# Altium footprint library MY_LIB_Connectors_CONNFLY.PcbLib: 239 footprints (part 12 of 15)
Each footprint in its own frame and in the unit in brackets; x right, y up, seen from the top. Pads: shape width x height; smd on the part's side, far side on the other; paste and mask are expansions set on the pad; w line width, h text height; cw(c..) or ccw(c..) is an arc to the next point about the centre after c.
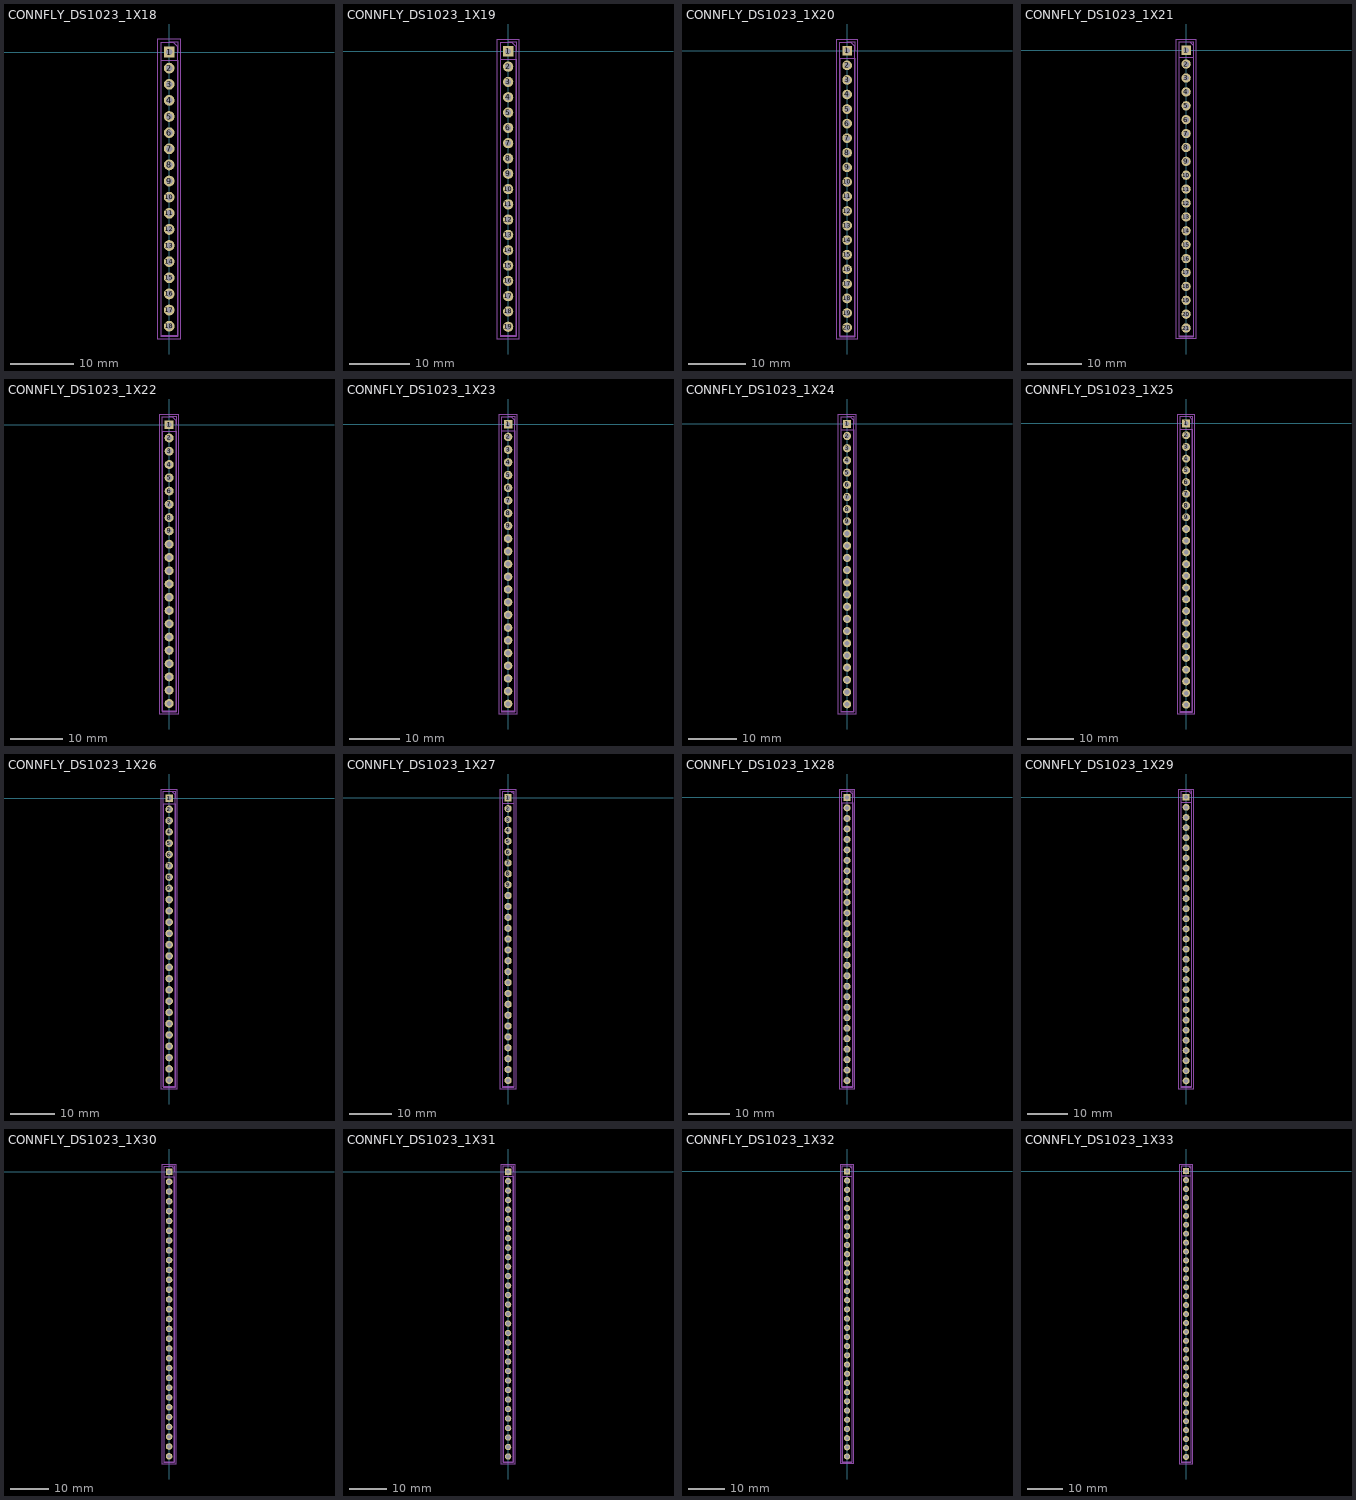
[diagram p11: the footprints below, top view; thin cyan lines are the x and y axes]

## CONNFLY_DS1023_1X18 [mm] "Connfly DS1023 1x18 standard KiCad; PTH1.0 pad1.7 pitch2.54; CC-BY-SA-4.0; STEP generic"
height 8.5
pads (18):
  rect 1.7x1.7 hole 1 paste-2539.97 mask+0.05: 1(0,0)
  round 1.7 hole 1 paste-2539.97 mask+0.05: 2(0,-2.54) 3(0,-5.08) 4(0,-7.62) 5(0,-10.16) 6(0,-12.7) 7(0,-15.24) 8(0,-17.78) 9(0,-20.32) 10(0,-22.86) 11(0,-25.4) 12(0,-27.94) 13(0,-30.48) 14(0,-33.02) 15(0,-35.56) 16(0,-38.1) 17(0,-40.64) 18(0,-43.18)
Mechanical 15:
  lines w0.05: -1.8,-45.2 -1.8,2.05 1.75,2.05 1.75,-45.2 -1.8,-45.2
  lines w0.1: -1.27,-44.7 -1.27,1.52 0.635,1.52 1.27,0.885 1.27,-44.7 -1.27,-44.7
  lines w0.12: 0,1.58 1.33,1.58 1.33,0 ; -1.33,-44.76 -1.33,-1.27 1.33,-1.27 1.33,-44.76 -1.33,-44.76
3D body "PinSocket_1x18_P2.54mm_Vertical.step": height 8.5, standoff -3.1, extent -1.27,-44.7 1.27,1.52

## CONNFLY_DS1023_1X19 [mm] "Connfly DS1023 1x19 standard KiCad; PTH1.0 pad1.7 pitch2.54; CC-BY-SA-4.0; STEP generic"
height 8.5
pads (19):
  rect 1.7x1.7 hole 1 paste-2539.97 mask+0.05: 1(0,0)
  round 1.7 hole 1 paste-2539.97 mask+0.05: 2(0,-2.54) 3(0,-5.08) 4(0,-7.62) 5(0,-10.16) 6(0,-12.7) 7(0,-15.24) 8(0,-17.78) 9(0,-20.32) 10(0,-22.86) 11(0,-25.4) 12(0,-27.94) 13(0,-30.48) 14(0,-33.02) 15(0,-35.56) 16(0,-38.1) 17(0,-40.64) 18(0,-43.18) 19(0,-45.72)
Mechanical 15:
  lines w0.05: -1.8,-47.75 -1.8,2.05 1.75,2.05 1.75,-47.75 -1.8,-47.75
  lines w0.1: -1.27,-47.24 -1.27,1.52 0.635,1.52 1.27,0.885 1.27,-47.24 -1.27,-47.24
  lines w0.12: 0,1.58 1.33,1.58 1.33,0 ; -1.33,-47.3 -1.33,-1.27 1.33,-1.27 1.33,-47.3 -1.33,-47.3
3D body "PinSocket_1x19_P2.54mm_Vertical.step": height 8.5, standoff -3.1, extent -1.27,-47.24 1.27,1.52

## CONNFLY_DS1023_1X20 [mm] "Connfly DS1023 1x20 standard KiCad; PTH1.0 pad1.7 pitch2.54; CC-BY-SA-4.0; STEP generic"
height 8.5
pads (20):
  rect 1.7x1.7 hole 1 paste-2539.97 mask+0.05: 1(0,0)
  round 1.7 hole 1 paste-2539.97 mask+0.05: 2(0,-2.54) 3(0,-5.08) 4(0,-7.62) 5(0,-10.16) 6(0,-12.7) 7(0,-15.24) 8(0,-17.78) 9(0,-20.32) 10(0,-22.86) 11(0,-25.4) 12(0,-27.94) 13(0,-30.48) 14(0,-33.02) 15(0,-35.56) 16(0,-38.1) 17(0,-40.64) 18(0,-43.18) 19(0,-45.72) 20(0,-48.26)
Mechanical 15:
  lines w0.05: -1.8,-50.25 -1.8,2.05 1.75,2.05 1.75,-50.25 -1.8,-50.25
  lines w0.1: -1.27,-49.78 -1.27,1.52 0.635,1.52 1.27,0.885 1.27,-49.78 -1.27,-49.78
  lines w0.12: 0,1.58 1.33,1.58 1.33,0 ; -1.33,-49.84 -1.33,-1.27 1.33,-1.27 1.33,-49.84 -1.33,-49.84
3D body "PinSocket_1x20_P2.54mm_Vertical.step": height 8.5, standoff -3.1, extent -1.27,-49.78 1.27,1.52

## CONNFLY_DS1023_1X21 [mm] "Connfly DS1023 1x21 standard KiCad; PTH1.0 pad1.7 pitch2.54; CC-BY-SA-4.0; STEP generic"
height 8.5
pads (21):
  rect 1.7x1.7 hole 1 paste-2539.97 mask+0.05: 1(0,0)
  round 1.7 hole 1 paste-2539.97 mask+0.05: 2(0,-2.54) 3(0,-5.08) 4(0,-7.62) 5(0,-10.16) 6(0,-12.7) 7(0,-15.24) 8(0,-17.78) 9(0,-20.32) 10(0,-22.86) 11(0,-25.4) 12(0,-27.94) 13(0,-30.48) 14(0,-33.02) 15(0,-35.56) 16(0,-38.1) 17(0,-40.64) 18(0,-43.18) 19(0,-45.72) 20(0,-48.26) 21(0,-50.8)
Mechanical 15:
  lines w0.05: -1.8,-52.8 -1.8,2.05 1.75,2.05 1.75,-52.8 -1.8,-52.8
  lines w0.1: -1.27,-52.32 -1.27,1.52 0.635,1.52 1.27,0.885 1.27,-52.32 -1.27,-52.32
  lines w0.12: 0,1.58 1.33,1.58 1.33,0 ; -1.33,-52.38 -1.33,-1.27 1.33,-1.27 1.33,-52.38 -1.33,-52.38
3D body "PinSocket_1x21_P2.54mm_Vertical.step": height 8.5, standoff -3.1, extent -1.27,-52.32 1.27,1.52

## CONNFLY_DS1023_1X22 [mm] "Connfly DS1023 1x22 standard KiCad; PTH1.0 pad1.7 pitch2.54; CC-BY-SA-4.0; STEP generic"
height 8.5
pads (22):
  rect 1.7x1.7 hole 1 paste-2539.97 mask+0.05: 1(0,0)
  round 1.7 hole 1 paste-2539.97 mask+0.05: 2(0,-2.54) 3(0,-5.08) 4(0,-7.62) 5(0,-10.16) 6(0,-12.7) 7(0,-15.24) 8(0,-17.78) 9(0,-20.32) 10(0,-22.86) 11(0,-25.4) 12(0,-27.94) 13(0,-30.48) 14(0,-33.02) 15(0,-35.56) 16(0,-38.1) 17(0,-40.64) 18(0,-43.18) 19(0,-45.72) 20(0,-48.26) 21(0,-50.8) 22(0,-53.34)
Mechanical 15:
  lines w0.05: -1.8,-55.35 -1.8,2.05 1.75,2.05 1.75,-55.35 -1.8,-55.35
  lines w0.1: -1.27,-54.86 -1.27,1.52 0.635,1.52 1.27,0.885 1.27,-54.86 -1.27,-54.86
  lines w0.12: 0,1.58 1.33,1.58 1.33,0 ; -1.33,-54.92 -1.33,-1.27 1.33,-1.27 1.33,-54.92 -1.33,-54.92
3D body "PinSocket_1x22_P2.54mm_Vertical.step": height 8.5, standoff -3.1, extent -1.27,-54.86 1.27,1.52

## CONNFLY_DS1023_1X23 [mm] "Connfly DS1023 1x23 standard KiCad; PTH1.0 pad1.7 pitch2.54; CC-BY-SA-4.0; STEP generic"
height 8.5
pads (23):
  rect 1.7x1.7 hole 1 paste-2539.97 mask+0.05: 1(0,0)
  round 1.7 hole 1 paste-2539.97 mask+0.05: 2(0,-2.54) 3(0,-5.08) 4(0,-7.62) 5(0,-10.16) 6(0,-12.7) 7(0,-15.24) 8(0,-17.78) 9(0,-20.32) 10(0,-22.86) 11(0,-25.4) 12(0,-27.94) 13(0,-30.48) 14(0,-33.02) 15(0,-35.56) 16(0,-38.1) 17(0,-40.64) 18(0,-43.18) 19(0,-45.72) 20(0,-48.26) 21(0,-50.8) 22(0,-53.34) 23(0,-55.88)
Mechanical 15:
  lines w0.05: -1.8,-57.9 -1.8,2.05 1.75,2.05 1.75,-57.9 -1.8,-57.9
  lines w0.1: -1.27,-57.4 -1.27,1.52 0.635,1.52 1.27,0.885 1.27,-57.4 -1.27,-57.4
  lines w0.12: 0,1.58 1.33,1.58 1.33,0 ; -1.33,-57.46 -1.33,-1.27 1.33,-1.27 1.33,-57.46 -1.33,-57.46
3D body "PinSocket_1x23_P2.54mm_Vertical.step": height 8.5, standoff -3.1, extent -1.27,-57.4 1.27,1.52

## CONNFLY_DS1023_1X24 [mm] "Connfly DS1023 1x24 standard KiCad; PTH1.0 pad1.7 pitch2.54; CC-BY-SA-4.0; STEP generic"
height 8.5
pads (24):
  rect 1.7x1.7 hole 1 paste-2539.97 mask+0.05: 1(0,0)
  round 1.7 hole 1 paste-2539.97 mask+0.05: 2(0,-2.54) 3(0,-5.08) 4(0,-7.62) 5(0,-10.16) 6(0,-12.7) 7(0,-15.24) 8(0,-17.78) 9(0,-20.32) 10(0,-22.86) 11(0,-25.4) 12(0,-27.94) 13(0,-30.48) 14(0,-33.02) 15(0,-35.56) 16(0,-38.1) 17(0,-40.64) 18(0,-43.18) 19(0,-45.72) 20(0,-48.26) 21(0,-50.8) 22(0,-53.34) 23(0,-55.88) 24(0,-58.42)
Mechanical 15:
  lines w0.05: -1.8,-60.45 -1.8,2.05 1.75,2.05 1.75,-60.45 -1.8,-60.45
  lines w0.1: -1.27,-59.94 -1.27,1.52 0.635,1.52 1.27,0.885 1.27,-59.94 -1.27,-59.94
  lines w0.12: 0,1.58 1.33,1.58 1.33,0 ; -1.33,-60 -1.33,-1.27 1.33,-1.27 1.33,-60 -1.33,-60
3D body "PinSocket_1x24_P2.54mm_Vertical.step": height 8.5, standoff -3.1, extent -1.27,-59.94 1.27,1.52

## CONNFLY_DS1023_1X25 [mm] "Connfly DS1023 1x25 standard KiCad; PTH1.0 pad1.7 pitch2.54; CC-BY-SA-4.0; STEP generic"
height 8.5
pads (25):
  rect 1.7x1.7 hole 1 paste-2539.97 mask+0.05: 1(0,0)
  round 1.7 hole 1 paste-2539.97 mask+0.05: 2(0,-2.54) 3(0,-5.08) 4(0,-7.62) 5(0,-10.16) 6(0,-12.7) 7(0,-15.24) 8(0,-17.78) 9(0,-20.32) 10(0,-22.86) 11(0,-25.4) 12(0,-27.94) 13(0,-30.48) 14(0,-33.02) 15(0,-35.56) 16(0,-38.1) 17(0,-40.64) 18(0,-43.18) 19(0,-45.72) 20(0,-48.26) 21(0,-50.8) 22(0,-53.34) 23(0,-55.88) 24(0,-58.42) 25(0,-60.96)
Mechanical 15:
  lines w0.05: -1.8,-62.95 -1.8,2.05 1.75,2.05 1.75,-62.95 -1.8,-62.95
  lines w0.1: -1.27,-62.48 -1.27,1.52 0.635,1.52 1.27,0.885 1.27,-62.48 -1.27,-62.48
  lines w0.12: 0,1.58 1.33,1.58 1.33,0 ; -1.33,-62.54 -1.33,-1.27 1.33,-1.27 1.33,-62.54 -1.33,-62.54
3D body "PinSocket_1x25_P2.54mm_Vertical.step": height 8.5, standoff -3.1, extent -1.27,-62.48 1.27,1.52

## CONNFLY_DS1023_1X26 [mm] "Connfly DS1023 1x26 standard KiCad; PTH1.0 pad1.7 pitch2.54; CC-BY-SA-4.0; STEP generic"
height 8.5
pads (26):
  rect 1.7x1.7 hole 1 paste-2539.97 mask+0.05: 1(0,0)
  round 1.7 hole 1 paste-2539.97 mask+0.05: 2(0,-2.54) 3(0,-5.08) 4(0,-7.62) 5(0,-10.16) 6(0,-12.7) 7(0,-15.24) 8(0,-17.78) 9(0,-20.32) 10(0,-22.86) 11(0,-25.4) 12(0,-27.94) 13(0,-30.48) 14(0,-33.02) 15(0,-35.56) 16(0,-38.1) 17(0,-40.64) 18(0,-43.18) 19(0,-45.72) 20(0,-48.26) 21(0,-50.8) 22(0,-53.34) 23(0,-55.88) 24(0,-58.42) 25(0,-60.96) 26(0,-63.5)
Mechanical 15:
  lines w0.05: -1.8,-65.5 -1.8,2.05 1.75,2.05 1.75,-65.5 -1.8,-65.5
  lines w0.1: -1.27,-65.02 -1.27,1.52 0.635,1.52 1.27,0.885 1.27,-65.02 -1.27,-65.02
  lines w0.12: 0,1.58 1.33,1.58 1.33,0 ; -1.33,-65.08 -1.33,-1.27 1.33,-1.27 1.33,-65.08 -1.33,-65.08
3D body "PinSocket_1x26_P2.54mm_Vertical.step": height 8.5, standoff -3.1, extent -1.27,-65.02 1.27,1.52

## CONNFLY_DS1023_1X27 [mm] "Connfly DS1023 1x27 standard KiCad; PTH1.0 pad1.7 pitch2.54; CC-BY-SA-4.0; STEP generic"
height 8.5
pads (27):
  rect 1.7x1.7 hole 1 paste-2539.97 mask+0.05: 1(0,0)
  round 1.7 hole 1 paste-2539.97 mask+0.05: 2(0,-2.54) 3(0,-5.08) 4(0,-7.62) 5(0,-10.16) 6(0,-12.7) 7(0,-15.24) 8(0,-17.78) 9(0,-20.32) 10(0,-22.86) 11(0,-25.4) 12(0,-27.94) 13(0,-30.48) 14(0,-33.02) 15(0,-35.56) 16(0,-38.1) 17(0,-40.64) 18(0,-43.18) 19(0,-45.72) 20(0,-48.26) 21(0,-50.8) 22(0,-53.34) 23(0,-55.88) 24(0,-58.42) 25(0,-60.96) 26(0,-63.5) 27(0,-66.04)
Mechanical 15:
  lines w0.05: -1.8,-68.05 -1.8,2.05 1.75,2.05 1.75,-68.05 -1.8,-68.05
  lines w0.1: -1.27,-67.56 -1.27,1.52 0.635,1.52 1.27,0.885 1.27,-67.56 -1.27,-67.56
  lines w0.12: 0,1.58 1.33,1.58 1.33,0 ; -1.33,-67.62 -1.33,-1.27 1.33,-1.27 1.33,-67.62 -1.33,-67.62
3D body "PinSocket_1x27_P2.54mm_Vertical.step": height 8.5, standoff -3.1, extent -1.27,-67.56 1.27,1.52

## CONNFLY_DS1023_1X28 [mm] "Connfly DS1023 1x28 standard KiCad; PTH1.0 pad1.7 pitch2.54; CC-BY-SA-4.0; STEP generic"
height 8.5
pads (28):
  rect 1.7x1.7 hole 1 paste-2539.97 mask+0.05: 1(0,0)
  round 1.7 hole 1 paste-2539.97 mask+0.05: 2(0,-2.54) 3(0,-5.08) 4(0,-7.62) 5(0,-10.16) 6(0,-12.7) 7(0,-15.24) 8(0,-17.78) 9(0,-20.32) 10(0,-22.86) 11(0,-25.4) 12(0,-27.94) 13(0,-30.48) 14(0,-33.02) 15(0,-35.56) 16(0,-38.1) 17(0,-40.64) 18(0,-43.18) 19(0,-45.72) 20(0,-48.26) 21(0,-50.8) 22(0,-53.34) 23(0,-55.88) 24(0,-58.42) 25(0,-60.96) 26(0,-63.5) 27(0,-66.04) 28(0,-68.58)
Mechanical 15:
  lines w0.05: -1.8,-70.6 -1.8,2.05 1.75,2.05 1.75,-70.6 -1.8,-70.6
  lines w0.1: -1.27,-70.1 -1.27,1.52 0.635,1.52 1.27,0.885 1.27,-70.1 -1.27,-70.1
  lines w0.12: 0,1.58 1.33,1.58 1.33,0 ; -1.33,-70.16 -1.33,-1.27 1.33,-1.27 1.33,-70.16 -1.33,-70.16
3D body "PinSocket_1x28_P2.54mm_Vertical.step": height 8.5, standoff -3.1, extent -1.27,-70.1 1.27,1.52

## CONNFLY_DS1023_1X29 [mm] "Connfly DS1023 1x29 standard KiCad; PTH1.0 pad1.7 pitch2.54; CC-BY-SA-4.0; STEP generic"
height 8.5
pads (29):
  rect 1.7x1.7 hole 1 paste-2539.97 mask+0.05: 1(0,0)
  round 1.7 hole 1 paste-2539.97 mask+0.05: 2(0,-2.54) 3(0,-5.08) 4(0,-7.62) 5(0,-10.16) 6(0,-12.7) 7(0,-15.24) 8(0,-17.78) 9(0,-20.32) 10(0,-22.86) 11(0,-25.4) 12(0,-27.94) 13(0,-30.48) 14(0,-33.02) 15(0,-35.56) 16(0,-38.1) 17(0,-40.64) 18(0,-43.18) 19(0,-45.72) 20(0,-48.26) 21(0,-50.8) 22(0,-53.34) 23(0,-55.88) 24(0,-58.42) 25(0,-60.96) 26(0,-63.5) 27(0,-66.04) 28(0,-68.58) 29(0,-71.12)
Mechanical 15:
  lines w0.05: -1.8,-73.15 -1.8,2.05 1.75,2.05 1.75,-73.15 -1.8,-73.15
  lines w0.1: -1.27,-72.64 -1.27,1.52 0.635,1.52 1.27,0.885 1.27,-72.64 -1.27,-72.64
  lines w0.12: 0,1.58 1.33,1.58 1.33,0 ; -1.33,-72.7 -1.33,-1.27 1.33,-1.27 1.33,-72.7 -1.33,-72.7
3D body "PinSocket_1x29_P2.54mm_Vertical.step": height 8.5, standoff -3.1, extent -1.27,-72.64 1.27,1.52

## CONNFLY_DS1023_1X30 [mm] "Connfly DS1023 1x30 standard KiCad; PTH1.0 pad1.7 pitch2.54; CC-BY-SA-4.0; STEP generic"
height 8.5
pads (30):
  rect 1.7x1.7 hole 1 paste-2539.97 mask+0.05: 1(0,0)
  round 1.7 hole 1 paste-2539.97 mask+0.05: 2(0,-2.54) 3(0,-5.08) 4(0,-7.62) 5(0,-10.16) 6(0,-12.7) 7(0,-15.24) 8(0,-17.78) 9(0,-20.32) 10(0,-22.86) 11(0,-25.4) 12(0,-27.94) 13(0,-30.48) 14(0,-33.02) 15(0,-35.56) 16(0,-38.1) 17(0,-40.64) 18(0,-43.18) 19(0,-45.72) 20(0,-48.26) 21(0,-50.8) 22(0,-53.34) 23(0,-55.88) 24(0,-58.42) 25(0,-60.96) 26(0,-63.5) 27(0,-66.04) 28(0,-68.58) 29(0,-71.12) 30(0,-73.66)
Mechanical 15:
  lines w0.05: -1.8,-75.65 -1.8,2.05 1.75,2.05 1.75,-75.65 -1.8,-75.65
  lines w0.1: -1.27,-75.18 -1.27,1.52 0.635,1.52 1.27,0.885 1.27,-75.18 -1.27,-75.18
  lines w0.12: 0,1.58 1.33,1.58 1.33,0 ; -1.33,-75.24 -1.33,-1.27 1.33,-1.27 1.33,-75.24 -1.33,-75.24
3D body "PinSocket_1x30_P2.54mm_Vertical.step": height 8.5, standoff -3.1, extent -1.27,-75.18 1.27,1.52

## CONNFLY_DS1023_1X31 [mm] "Connfly DS1023 1x31 standard KiCad; PTH1.0 pad1.7 pitch2.54; CC-BY-SA-4.0; STEP generic"
height 8.5
pads (31):
  rect 1.7x1.7 hole 1 paste-2539.97 mask+0.05: 1(0,0)
  round 1.7 hole 1 paste-2539.97 mask+0.05: 2(0,-2.54) 3(0,-5.08) 4(0,-7.62) 5(0,-10.16) 6(0,-12.7) 7(0,-15.24) 8(0,-17.78) 9(0,-20.32) 10(0,-22.86) 11(0,-25.4) 12(0,-27.94) 13(0,-30.48) 14(0,-33.02) 15(0,-35.56) 16(0,-38.1) 17(0,-40.64) 18(0,-43.18) 19(0,-45.72) 20(0,-48.26) 21(0,-50.8) 22(0,-53.34) 23(0,-55.88) 24(0,-58.42) 25(0,-60.96) 26(0,-63.5) 27(0,-66.04) 28(0,-68.58) 29(0,-71.12) 30(0,-73.66) 31(0,-76.2)
Mechanical 15:
  lines w0.05: -1.8,-78.2 -1.8,2.05 1.75,2.05 1.75,-78.2 -1.8,-78.2
  lines w0.1: -1.27,-77.72 -1.27,1.52 0.635,1.52 1.27,0.885 1.27,-77.72 -1.27,-77.72
  lines w0.12: 0,1.58 1.33,1.58 1.33,0 ; -1.33,-77.78 -1.33,-1.27 1.33,-1.27 1.33,-77.78 -1.33,-77.78
3D body "PinSocket_1x31_P2.54mm_Vertical.step": height 8.5, standoff -3.1, extent -1.27,-77.72 1.27,1.52

## CONNFLY_DS1023_1X32 [mm] "Connfly DS1023 1x32 standard KiCad; PTH1.0 pad1.7 pitch2.54; CC-BY-SA-4.0; STEP generic"
height 8.5
pads (32):
  rect 1.7x1.7 hole 1 paste-2539.97 mask+0.05: 1(0,0)
  round 1.7 hole 1 paste-2539.97 mask+0.05: 2(0,-2.54) 3(0,-5.08) 4(0,-7.62) 5(0,-10.16) 6(0,-12.7) 7(0,-15.24) 8(0,-17.78) 9(0,-20.32) 10(0,-22.86) 11(0,-25.4) 12(0,-27.94) 13(0,-30.48) 14(0,-33.02) 15(0,-35.56) 16(0,-38.1) 17(0,-40.64) 18(0,-43.18) 19(0,-45.72) 20(0,-48.26) 21(0,-50.8) 22(0,-53.34) 23(0,-55.88) 24(0,-58.42) 25(0,-60.96) 26(0,-63.5) 27(0,-66.04) 28(0,-68.58) 29(0,-71.12) 30(0,-73.66) 31(0,-76.2) 32(0,-78.74)
Mechanical 15:
  lines w0.05: -1.8,-80.8 -1.8,2.05 1.75,2.05 1.75,-80.8 -1.8,-80.8
  lines w0.1: -1.27,-80.26 -1.27,1.52 0.635,1.52 1.27,0.885 1.27,-80.26 -1.27,-80.26
  lines w0.12: 0,1.58 1.33,1.58 1.33,0 ; -1.33,-80.32 -1.33,-1.27 1.33,-1.27 1.33,-80.32 -1.33,-80.32
3D body "PinSocket_1x32_P2.54mm_Vertical.step": height 8.5, standoff -3.1, extent -1.27,-80.26 1.27,1.52

## CONNFLY_DS1023_1X33 [mm] "Connfly DS1023 1x33 standard KiCad; PTH1.0 pad1.7 pitch2.54; CC-BY-SA-4.0; STEP generic"
height 8.5
pads (33):
  rect 1.7x1.7 hole 1 paste-2539.97 mask+0.05: 1(0,0)
  round 1.7 hole 1 paste-2539.97 mask+0.05: 2(0,-2.54) 3(0,-5.08) 4(0,-7.62) 5(0,-10.16) 6(0,-12.7) 7(0,-15.24) 8(0,-17.78) 9(0,-20.32) 10(0,-22.86) 11(0,-25.4) 12(0,-27.94) 13(0,-30.48) 14(0,-33.02) 15(0,-35.56) 16(0,-38.1) 17(0,-40.64) 18(0,-43.18) 19(0,-45.72) 20(0,-48.26) 21(0,-50.8) 22(0,-53.34) 23(0,-55.88) 24(0,-58.42) 25(0,-60.96) 26(0,-63.5) 27(0,-66.04) 28(0,-68.58) 29(0,-71.12) 30(0,-73.66) 31(0,-76.2) 32(0,-78.74) 33(0,-81.28)
Mechanical 15:
  lines w0.05: -1.8,-83.3 -1.8,2.05 1.75,2.05 1.75,-83.3 -1.8,-83.3
  lines w0.1: -1.27,-82.8 -1.27,1.52 0.635,1.52 1.27,0.885 1.27,-82.8 -1.27,-82.8
  lines w0.12: 0,1.58 1.33,1.58 1.33,0 ; -1.33,-82.86 -1.33,-1.27 1.33,-1.27 1.33,-82.86 -1.33,-82.86
3D body "PinSocket_1x33_P2.54mm_Vertical.step": height 8.5, standoff -3.1, extent -1.27,-82.8 1.27,1.52